# Altium schematic symbol library Misc-LIB-SCH.SchLib: 8 symbols
Pins are listed as number, name and electrical type; pins without a type are passive.

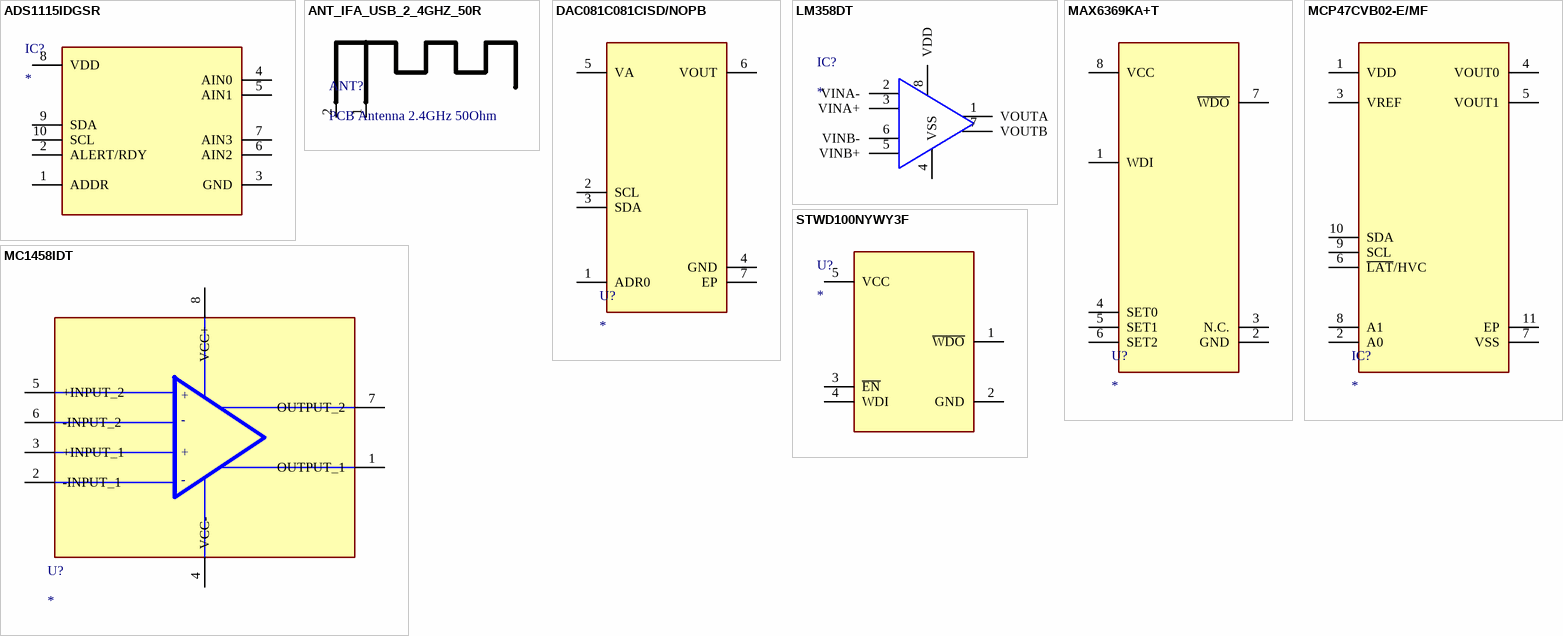
[diagram p0: symbols ADS1115IDGSR to STWD100NYWY3F]

## ADS1115IDGSR
designator IC?
ADC; Manufacturer: Texas Instruments; Manufacturer Part Number: ADS1115IDGSR; Population Status: YES; Datasheet Link: http://www.ti.com/lit/gpn/ADS1115; Height: 1.1mm; Supplier Part Number: 595-ADS1115IDGSR
footprint SOP50P490X110-10N
pins: 1 ADDR, 2 ALERT/RDY, 3 GND, 4 AIN0, 5 AIN1, 6 AIN2, 7 AIN3, 8 VDD, 9 SDA, 10 SCL

## ANT_IFA_USB_2_4GHZ_50R
designator ANT?, comment PCB Antenna 2.4GHz 50Ohm  (no BOM)
Inverted F 2.4GHz ISM PCB Antenna 50 Ohm
footprint ANT_IFA_USB_2_4GHZ_50R
pins: 1 RF, 2 GND

## DAC081C081CISD/NOPB
designator U?
8 Bit Digital to Analog Converter 1 6-WSON (2.2x2.5); Manufacturer Part Number: DAC081C081CISD/NOPB; Manufacturer: Texas Instruments; Est Price INR: 131.38; Population Status: YES; Supply Voltage: 2.7 to 5.5V; Datasheet Link: http://www.ti.com/lit/gpn/dac081c081; Height: 0.8mm; Package: WSON-6; Supplier Part Number: 926-DA081C081CISDNPB; Supplier: Mouser; Temperature Range: -40 to 125; Weight: 9.7mg
footprint SON65P250X220X80-7N
pins: 1 ADR0, 2 SCL, 3 SDA, 4 GND, 5 VA, 6 VOUT, 7 EP

## LM358DT
designator IC?
Integrated Circuit; Manufacturer: Microchip; Manufacturer Part Number: MCP6002-I/SN; Population Status: YES; Datasheet Link: https://datasheet.datasheetarchive.com/originals/distributors/SFDatasheet-4/sf-00090086.pdf; Height: 1.75mm; Supplier Part Number: 579-MCP6002-I/SN
footprint SOIC127P600X175-8N
pins: 1 VOUTA, 2 VINA-, 3 VINA+, 4 VSS, 5 VINB+, 6 VINB-, 7 VOUTB, 8 VDD

## MAX6369KA+T
designator U?
Supervisor Open Drain or Open Collector 1 Channel SOT-23-8; Manufacturer Part Number: MAX6369KA+T; Manufacturer: Analog Devices / Maxim Integrated; Est Price INR: 570.26; Max Current: 20mA; Population Status: YES; Supply Voltage: 2.5 to 5.5V; Datasheet Link: https://datasheets.maximintegrated.com/en/ds/MAX6369-MAX6374.pdf; Height: 1.45mm; Package: SOT-23-8; Supplier Part Number: 700-MAX6369KAT; Supplier: Mouser; Temperature Range: -40 to 125; Weight: 40mg
footprint SOT65P280X145-8N
pins: 1 WDI, 2 GND, 3 N.C., 4 SET0, 5 SET1, 6 SET2, 7 ~{WDO}, 8 VCC

## MC1458IDT
designator U?
IC OPAMP GP 2 CIRCUIT 8SOIC; Manufacturer Part Number: MC1458IDT; Manufacturer: STMicroelectronics; Est Price INR: 57.77; Max Current: 2.3mA; Population Status: YES; Supply Voltage: -22 to 22V; Datasheet Link: https://www.st.com/resource/en/datasheet/mc1458.pdf; Height: 1.75mm; Package: SOIC-8; Supplier Part Number: 511-MC1458IDT; Supplier: Mouser; Temperature Range: -40 to 105; Weight: 74mg
footprint SOIC127P600X175-8N
pins: 1 OUTPUT_1, 2 -INPUT_1, 3 +INPUT_1, 4 VCC-, 5 +INPUT_2, 6 -INPUT_2, 7 OUTPUT_2, 8 VCC+
text: +; -

## MCP47CVB02-E/MF
designator IC?
Integrated Circuit; Manufacturer_Name: Microchip; Manufacturer_Part_Number: MCP47CVB02-E/MF; Datasheet Link: https://ww1.microchip.com/downloads/en/DeviceDoc/MCP47CXBXX-Data-Sheet-DS20006089B.pdf; Height: 1mm; Mouser Part Number: 579-MCP47CVB02-E/MF; Mouser Price/Stock: https://www.mouser.co.uk/ProductDetail/Microchip-Technology/MCP47CVB02-E-MF?qs=byeeYqUIh0PIIZ8gzsmgfw%3D%3D; Arrow Part Number: MCP47CVB02-E/MF; Arrow Price/Stock: https://www.arrow.com/en/products/mcp47cvb02-emf/microchip-technology?utm_currency=USD&region=nac
footprint SON50P300X300X100-11N-D
pins: 1 VDD, 2 A0, 3 VREF, 4 VOUT0, 5 VOUT1, 6 ~{LAT}/HVC, 7 VSS, 8 A1, 9 SCL, 10 SDA, 11 EP

## STWD100NYWY3F
designator U?
Supervisor Open Drain or Open Collector 1 Channel SOT-23-5; Manufacturer: STMicroelectronics; Manufacturer Part Number: STWD100NYWY3F; Max Current: 0.1mA; Supply Voltage: 2.7 to 5.5V; Est Price INR: 97.84; Population Status: YES; Datasheet Link: https://www.st.com/resource/en/datasheet/stwd100.pdf; Height: 1.45mm; Supplier Part Number: 511-STWD100NYWY3F; Package: SOT-23-5; Supplier: Mouser; Temperature Range: -40 to 125; Weight: 65mg
footprint SOT95P280X145-5N
pins: 1 ~{WDO}, 2 GND, 3 ~{EN}, 4 WDI, 5 VCC